# Altium footprint library RC0603FR-0720KL.PcbLib: 3 footprints
Each footprint in its own frame and in the unit in brackets; x right, y up, seen from the top. Pads: shape width x height; smd on the part's side, far side on the other; paste and mask are expansions set on the pad; w line width, h text height; cw(c..) or ccw(c..) is an arc to the next point about the centre after c.
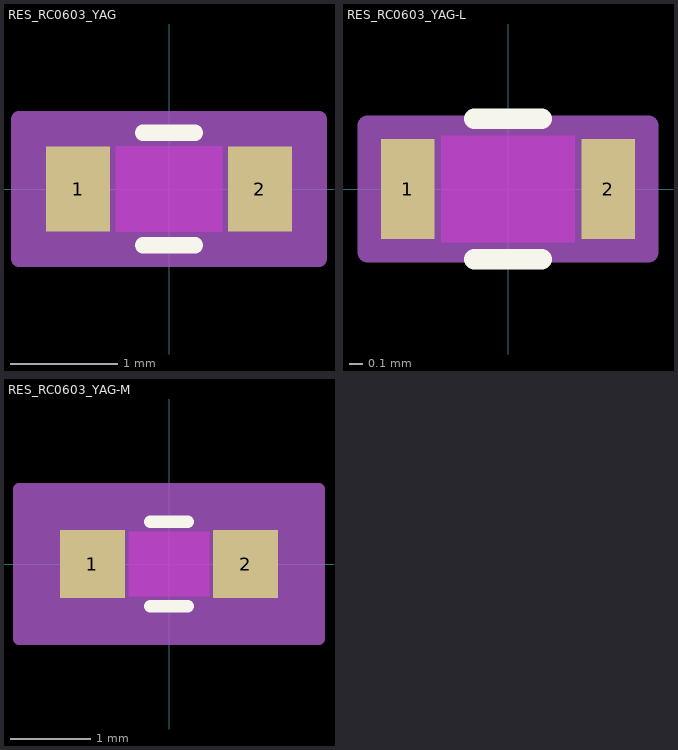
[diagram p0: the footprints below, top view; thin cyan lines are the x and y axes]

## RES_RC0603_YAG [mm]
pads (2):
  rect 0.6x0.8 smd paste+0 mask+0: 1(-0.85,0) 2(0.85,0)
Top Layer keep-out:
  region: -0.499,-0.349 -0.499,0.349 0.499,0.349 0.499,-0.349
Top Overlay:
  lines w0.152: -0.242,-0.527 0.242,-0.527 ; -0.242,0.527 0.242,0.527
Keep-Out Layer:
  region: -0.499,-0.4 -0.499,0.4 0.499,0.4 0.499,-0.4
Mechanical 13:
  lines w0.025: -0.8,-0.4 -0.8,0.4 ; -0.8,-0.4 0.8,-0.4 ; -0.8,-0.4 -0.55,-0.4 -0.55,0.4 -0.8,0.4 ; -0.8,-0.4 -0.8,0.4 ; -0.8,0.4 0.8,0.4 ; 0.8,-0.4 0.8,0.4 ; 0.8,-0.4 0.8,0.4 ; 0.8,-0.4 0.55,-0.4 0.55,0.4 0.8,0.4
Mechanical 15:
  region: 1.404,-0.654 -1.404,-0.654 -1.404,0.654 1.404,0.654
  lines w0.152: -1.404,-0.654 1.404,-0.654 1.404,0.654 -1.404,0.654 -1.404,-0.654
3D body "RES_RC0603_YAG.step": height 0.45, standoff 0, extent -0.8,-0.4 0.8,0.4

## RES_RC0603_YAG-L [mm]
pads (2):
  rect 0.402x0.749 smd paste+0 mask+0: 1(-0.751,0) 2(0.751,0)
Top Layer keep-out:
  region: -0.499,-0.349 -0.499,0.349 0.499,0.349 0.499,-0.349
Top Overlay:
  lines w0.152: -0.254,-0.527 0.254,-0.527 ; -0.254,0.527 0.254,0.527
  text ".Designator" at -3.492,-0.635 h1.27
Keep-Out Layer:
  region: -0.499,-0.4 -0.499,0.4 0.499,0.4 0.499,-0.4
Mechanical 13:
  lines w0.025: -0.8,-0.4 -0.8,0.4 ; -0.8,-0.4 -0.55,-0.4 -0.55,0.4 -0.8,0.4 ; -0.8,-0.4 0.8,-0.4 ; -0.8,-0.4 -0.8,0.4 ; -0.8,0.4 0.8,0.4 ; 0.8,-0.4 0.55,-0.4 0.55,0.4 0.8,0.4 ; 0.8,-0.4 0.8,0.4 ; 0.8,-0.4 0.8,0.4
  text ".Designator" at -3.492,-0.635 h1.27
Mechanical 15:
  region: 1.054,-0.476 -1.054,-0.476 -1.054,0.476 1.054,0.476
  lines w0.152: -1.054,-0.476 -1.054,0.476 1.054,0.476 1.054,-0.476 -1.054,-0.476
3D body "RES_RC0603_YAG.step": height 0.45, standoff 0, extent -0.8,-0.4 0.8,0.4

## RES_RC0603_YAG-M [mm]
pads (2):
  rect 0.809x0.851 smd paste+0 mask+0: 1(-0.954,0) 2(0.954,0)
Top Layer keep-out:
  region: -0.499,-0.349 -0.499,0.349 0.499,0.349 0.499,-0.349
Top Overlay:
  lines w0.152: -0.233,-0.527 0.233,-0.527 ; -0.233,0.527 0.233,0.527
  text ".Designator" at -3.492,-0.635 h1.27
Keep-Out Layer:
  region: -0.499,-0.4 -0.499,0.4 0.499,0.4 0.499,-0.4
Mechanical 13:
  lines w0.025: -0.8,-0.4 -0.8,0.4 ; -0.8,-0.4 -0.55,-0.4 -0.55,0.4 -0.8,0.4 ; -0.8,-0.4 0.8,-0.4 ; -0.8,-0.4 -0.8,0.4 ; -0.8,0.4 0.8,0.4 ; 0.8,-0.4 0.55,-0.4 0.55,0.4 0.8,0.4 ; 0.8,-0.4 0.8,0.4 ; 0.8,-0.4 0.8,0.4
  text ".Designator" at -3.492,-0.635 h1.27
Mechanical 15:
  region: 1.867,-0.933 -1.867,-0.933 -1.867,0.933 1.867,0.933
  lines w0.152: -1.867,-0.933 -1.867,0.933 1.867,0.933 1.867,-0.933 -1.867,-0.933
3D body "RES_RC0603_YAG.step": height 0.45, standoff 0, extent -0.8,-0.4 0.8,0.4